# Altium footprint library Display.PcbLib: 7 footprints
Each footprint in its own frame and in the unit in brackets; x right, y up, seen from the top. Pads: shape width x height; smd on the part's side, far side on the other; paste and mask are expansions set on the pad; w line width, h text height; cw(c..) or ccw(c..) is an arc to the next point about the centre after c.
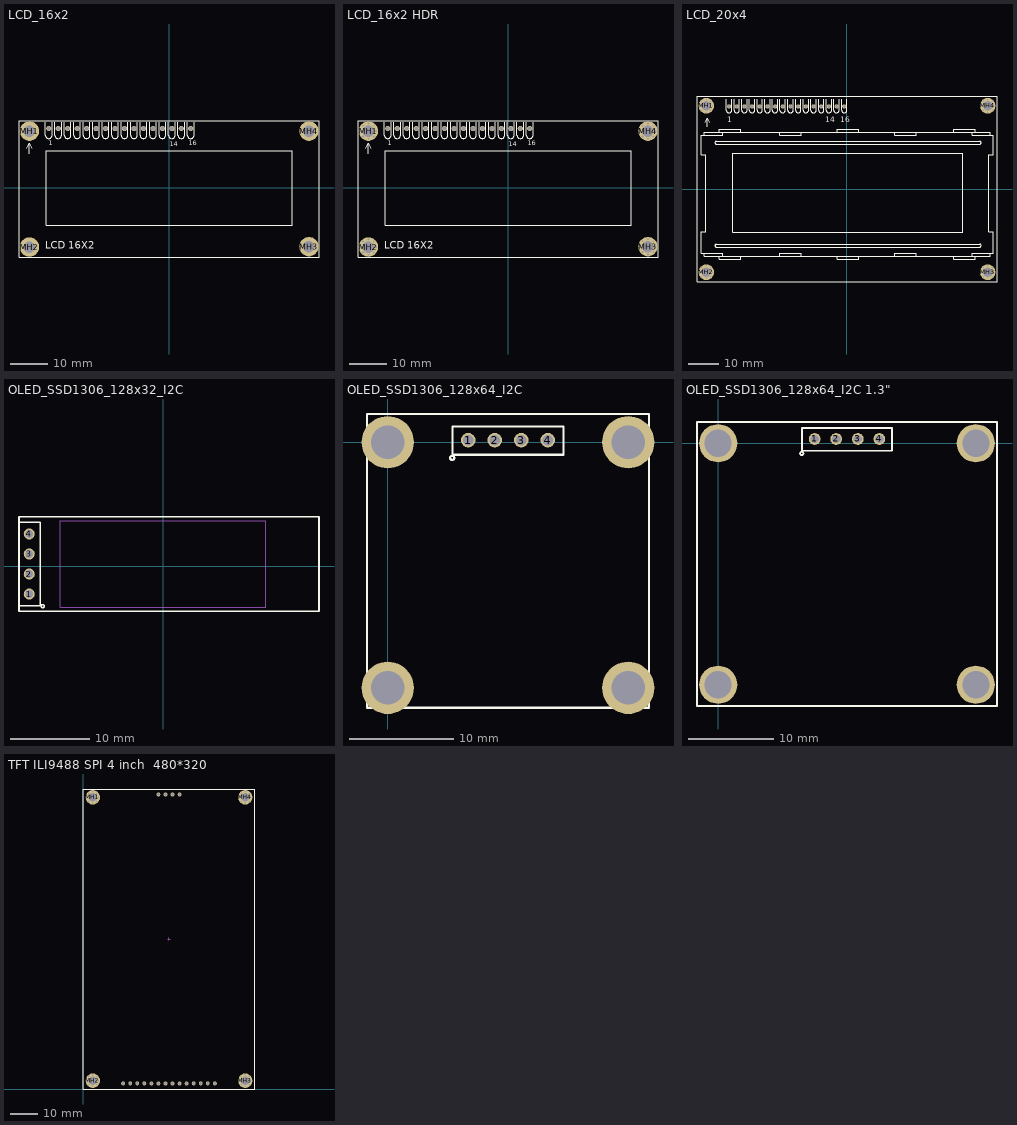
[diagram p0: the footprints below, top view; thin cyan lines are the x and y axes]

## LCD_16x2 [mm]
pads (20):
  round 1.4 / inner round 1.4 / far side oval 1.4x2.2 hole 1: 1(-32.3,15.9) 2(-29.76,15.9) 3(-27.22,15.9) 4(-24.68,15.9) 5(-22.14,15.9) 6(-19.6,15.9) 7(-17.06,15.9) 8(-14.52,15.9) 9(-11.98,15.9) 10(-9.44,15.9) 11(-6.9,15.9) 12(-4.36,15.9) 13(-1.82,15.9) 14(0.72,15.9) 15(3.26,15.9) 16(5.8,15.9)
  round 5.2 hole 3.1: MH1(-37.5,15.2) MH2(-37.5,-15.9) MH3(37.5,-15.8) MH4(37.5,15.2)
Top Overlay:
  lines w0.2: -38.154,10.666 -37.519,11.936 -36.884,10.666 ; -37.519,9.124 -37.519,11.809 ; -33.197,17.656 -33.197,14.1 ccw(c-32.308,14.1) -31.419,14.1 -31.419,17.656 ; -30.657,17.656 -30.657,14.1 ccw(c-29.768,14.1) -28.879,14.1 -28.879,17.656 ; -28.117,17.656 -28.117,14.1 ccw(c-27.228,14.1) -26.339,14.1 -26.339,17.656 ; -25.577,17.656 -25.577,14.1 ccw(c-24.688,14.1) -23.799,14.1 -23.799,17.656 ; -23.037,17.656 -23.037,14.1 ccw(c-22.148,14.1) -21.259,14.1 -21.259,17.656 ; -20.497,17.656 -20.497,14.1 ccw(c-19.608,14.1) -18.719,14.1 -18.719,17.656 ; -17.957,17.656 -17.957,14.1 ccw(c-17.068,14.1) -16.179,14.1 -16.179,17.656 ; -15.417,17.656 -15.417,14.1 ccw(c-14.528,14.1) -13.639,14.1 -13.639,17.656 ; -12.877,17.656 -12.877,14.1 ccw(c-11.988,14.1) -11.099,14.1 -11.099,17.656 ; -10.337,17.656 -10.337,14.1 ccw(c-9.448,14.1) -8.559,14.1 -8.559,17.656 ; -7.797,17.656 -7.797,14.1 ccw(c-6.908,14.1) -6.019,14.1 -6.019,17.656 ; -5.257,17.656 -5.257,14.1 ccw(c-4.368,14.1) -3.479,14.1 -3.479,17.656 ; -2.717,17.656 -2.717,14.1 ccw(c-1.828,14.1) -0.939,14.1 -0.939,17.656 ; -0.177,17.656 -0.177,14.1 ccw(c0.712,14.1) 1.601,14.1 1.601,17.656 ; 2.363,17.656 2.363,14.1 ccw(c3.252,14.1) 4.141,14.1 4.141,17.656 ; 4.903,17.656 4.903,14.1 ccw(c5.792,14.1) 6.681,14.1 6.681,17.656 ; -40.292,-18.568 40.208,-18.568 40.208,17.932 -40.292,17.932 -40.292,-18.568 ; -33,-10 33,-10 33,10 -33,10 -33,-10
  text "LCD 16X2" at -33.182,-16.296 h2
  text "16" at 5.284,11.433 h1.27
  text "1" at -32.308,11.433 h1.27
  text "14" at 0.204,11.179 h1.27
3D body "LCD 16x2 JHD162A.step": height 13.16, standoff 0.01, extent -39.997,-18.36 40.003,17.64
3D body "SCRW_CHSH_PHLIPS_M3X5.stp": height 6.43, standoff -0.9, extent 34.5,-18.8 40.5,-12.8
3D body "SCRW_CHSH_PHLIPS_M3X5.stp": height 6.43, standoff -0.9, extent -40.5,-18.9 -34.5,-12.9
3D body "SCRW_CHSH_PHLIPS_M3X5.stp": height 6.43, standoff -0.9, extent 34.5,12.2 40.5,18.2
3D body "SCRW_CHSH_PHLIPS_M3X5.stp": height 6.43, standoff -0.9, extent -40.5,12.2 -34.5,18.2
3D body "pin_header_aw140-eg-g02a.stp": height 8.72, standoff -3.68, extent 1.99,14.65 6.97,17.15
3D body "pin_header_aw140-eg-g02a.stp": height 8.72, standoff -3.68, extent -3.09,14.65 1.89,17.15
3D body "pin_header_aw140-eg-g02a.stp": height 8.72, standoff -3.68, extent -8.17,14.65 -3.19,17.15
3D body "pin_header_aw140-eg-g02a.stp": height 8.72, standoff -3.68, extent -13.25,14.65 -8.27,17.15
3D body "pin_header_aw140-eg-g02a.stp": height 8.72, standoff -3.68, extent -18.33,14.65 -13.35,17.15
3D body "pin_header_aw140-eg-g02a.stp": height 8.72, standoff -3.68, extent -23.41,14.65 -18.43,17.15
3D body "pin_header_aw140-eg-g02a.stp": height 8.72, standoff -3.68, extent -28.49,14.65 -23.51,17.15
3D body "pin_header_aw140-eg-g02a.stp": height 8.72, standoff -3.68, extent -33.57,14.65 -28.59,17.15

## LCD_16x2 HDR [mm]
pads (20):
  round 1.4 / inner round 1.4 / far side oval 1.4x2.2 hole 1: 1(-32.3,15.9) 2(-29.76,15.9) 3(-27.22,15.9) 4(-24.68,15.9) 5(-22.14,15.9) 6(-19.6,15.9) 7(-17.06,15.9) 8(-14.52,15.9) 9(-11.98,15.9) 10(-9.44,15.9) 11(-6.9,15.9) 12(-4.36,15.9) 13(-1.82,15.9) 14(0.72,15.9) 15(3.26,15.9) 16(5.8,15.9)
  round 5.2 hole 3.1: MH1(-37.5,15.2) MH2(-37.5,-15.9) MH3(37.5,-15.8) MH4(37.5,15.2)
via -35.45,15.2 diameter 1 hole 0.5
via -36.051,16.649 diameter 1 hole 0.5
via -37.5,17.25 diameter 1 hole 0.5
via -38.95,16.649 diameter 1 hole 0.5
via -39.55,15.2 diameter 1 hole 0.5
via -38.95,13.75 diameter 1 hole 0.5
via -37.5,13.15 diameter 1 hole 0.5
via -36.051,13.75 diameter 1 hole 0.5
via -35.45,-15.9 diameter 1 hole 0.5
via -36.051,-14.451 diameter 1 hole 0.5
via -37.5,-13.85 diameter 1 hole 0.5
via -38.95,-14.451 diameter 1 hole 0.5
via -39.55,-15.9 diameter 1 hole 0.5
via -38.95,-17.35 diameter 1 hole 0.5
via -37.5,-17.95 diameter 1 hole 0.5
via -36.051,-17.35 diameter 1 hole 0.5
via 39.55,-15.8 diameter 1 hole 0.5
via 38.949,-14.351 diameter 1 hole 0.5
via 37.5,-13.75 diameter 1 hole 0.5
via 36.05,-14.351 diameter 1 hole 0.5
via 35.45,-15.8 diameter 1 hole 0.5
via 36.05,-17.25 diameter 1 hole 0.5
via 37.5,-17.85 diameter 1 hole 0.5
via 38.949,-17.25 diameter 1 hole 0.5
via 39.55,15.2 diameter 1 hole 0.5
via 38.949,16.649 diameter 1 hole 0.5
via 37.5,17.25 diameter 1 hole 0.5
via 36.05,16.649 diameter 1 hole 0.5
via 35.45,15.2 diameter 1 hole 0.5
via 36.05,13.75 diameter 1 hole 0.5
via 37.5,13.15 diameter 1 hole 0.5
via 38.949,13.75 diameter 1 hole 0.5
Top Overlay:
  lines w0.2: -38.154,10.666 -37.519,11.936 -36.884,10.666 ; -37.519,9.124 -37.519,11.809 ; -33.197,17.656 -33.197,14.1 ccw(c-32.308,14.1) -31.419,14.1 -31.419,17.656 ; -30.657,17.656 -30.657,14.1 ccw(c-29.768,14.1) -28.879,14.1 -28.879,17.656 ; -28.117,17.656 -28.117,14.1 ccw(c-27.228,14.1) -26.339,14.1 -26.339,17.656 ; -25.577,17.656 -25.577,14.1 ccw(c-24.688,14.1) -23.799,14.1 -23.799,17.656 ; -23.037,17.656 -23.037,14.1 ccw(c-22.148,14.1) -21.259,14.1 -21.259,17.656 ; -20.497,17.656 -20.497,14.1 ccw(c-19.608,14.1) -18.719,14.1 -18.719,17.656 ; -17.957,17.656 -17.957,14.1 ccw(c-17.068,14.1) -16.179,14.1 -16.179,17.656 ; -15.417,17.656 -15.417,14.1 ccw(c-14.528,14.1) -13.639,14.1 -13.639,17.656 ; -12.877,17.656 -12.877,14.1 ccw(c-11.988,14.1) -11.099,14.1 -11.099,17.656 ; -10.337,17.656 -10.337,14.1 ccw(c-9.448,14.1) -8.559,14.1 -8.559,17.656 ; -7.797,17.656 -7.797,14.1 ccw(c-6.908,14.1) -6.019,14.1 -6.019,17.656 ; -5.257,17.656 -5.257,14.1 ccw(c-4.368,14.1) -3.479,14.1 -3.479,17.656 ; -2.717,17.656 -2.717,14.1 ccw(c-1.828,14.1) -0.939,14.1 -0.939,17.656 ; -0.177,17.656 -0.177,14.1 ccw(c0.712,14.1) 1.601,14.1 1.601,17.656 ; 2.363,17.656 2.363,14.1 ccw(c3.252,14.1) 4.141,14.1 4.141,17.656 ; 4.903,17.656 4.903,14.1 ccw(c5.792,14.1) 6.681,14.1 6.681,17.656 ; -40.292,-18.568 40.208,-18.568 40.208,17.932 -40.292,17.932 -40.292,-18.568 ; -33,-10 33,-10 33,10 -33,10 -33,-10
  text "LCD 16X2" at -33.182,-16.296 h2
  text "16" at 5.284,11.433 h1.27
  text "1" at -32.308,11.433 h1.27
  text "14" at 0.204,11.179 h1.27
3D body "LCD 16x2 JHD162A.step": height 25.6, standoff 12.45, extent -39.997,-18.36 40.003,17.64
3D body "14801-15 H.STEP": height 18.71, standoff -3.71, extent -39.8,12.9 -35.2,17.5
3D body "14801-15 H.STEP": height 18.71, standoff -3.71, extent -39.8,-18.2 -35.2,-13.6
3D body "14801-15 H.STEP": height 18.71, standoff -3.71, extent 35.2,-18.1 39.8,-13.5
3D body "14801-15 H.STEP": height 18.71, standoff -3.71, extent 35.2,12.9 39.8,17.5
3D body "PBD-2.stp": height 8.5, standoff -3.15, extent 1.99,14.63 7.07,17.17
3D body "PBD-2.stp": height 8.5, standoff -3.15, extent -3.09,14.63 1.99,17.17
3D body "PBD-2.stp": height 8.5, standoff -3.15, extent -8.17,14.63 -3.09,17.17
3D body "PBD-2.stp": height 8.5, standoff -3.15, extent -13.25,14.63 -8.17,17.17
3D body "PBD-2.stp": height 8.5, standoff -3.15, extent -18.33,14.63 -13.25,17.17
3D body "PBD-2.stp": height 8.5, standoff -3.15, extent -23.41,14.63 -18.33,17.17
3D body "PBD-2.stp": height 8.5, standoff -3.15, extent -28.49,14.63 -23.41,17.17
3D body "PBD-2.stp": height 8.5, standoff -3.15, extent -33.57,14.63 -28.49,17.17

## LCD_20x4 [mm] "93*55mm"
pads (20):
  round 1.4 / inner round 1.4 / far side oval 1.4x2.2 hole 1: 1(-39,27.3) 2(-36.46,27.3) 3(-33.92,27.3) 4(-31.38,27.3) 5(-28.84,27.3) 6(-26.3,27.3) 7(-23.76,27.3) 8(-21.22,27.3) 9(-18.68,27.3) 10(-16.14,27.3) 11(-13.6,27.3) 12(-11.06,27.3) 13(-8.52,27.3) 14(-5.98,27.3) 15(-3.44,27.3) 16(-0.9,27.3)
  round 5.2 hole 3.1: MH1(-46.5,27.5) MH2(-46.5,-27.5) MH3(46.5,-27.5) MH4(46.5,27.5)
via -44.45,27.5 diameter 1 hole 0.5
via -45.051,28.949 diameter 1 hole 0.5
via -46.5,29.55 diameter 1 hole 0.5
via -47.95,28.949 diameter 1 hole 0.5
via -48.55,27.5 diameter 1 hole 0.5
via -47.95,26.05 diameter 1 hole 0.5
via -46.5,25.45 diameter 1 hole 0.5
via -45.051,26.05 diameter 1 hole 0.5
via 48.55,27.5 diameter 1 hole 0.5
via 47.949,28.949 diameter 1 hole 0.5
via 46.5,29.55 diameter 1 hole 0.5
via 45.05,28.949 diameter 1 hole 0.5
via 44.45,27.5 diameter 1 hole 0.5
via 45.05,26.05 diameter 1 hole 0.5
via 46.5,25.45 diameter 1 hole 0.5
via 47.949,26.05 diameter 1 hole 0.5
via 48.55,-27.5 diameter 1 hole 0.5
via 47.949,-26.051 diameter 1 hole 0.5
via 46.5,-25.45 diameter 1 hole 0.5
via 45.05,-26.051 diameter 1 hole 0.5
via 44.45,-27.5 diameter 1 hole 0.5
via 45.05,-28.95 diameter 1 hole 0.5
via 46.5,-29.55 diameter 1 hole 0.5
via 47.949,-28.95 diameter 1 hole 0.5
via -44.45,-27.5 diameter 1 hole 0.5
via -45.051,-26.051 diameter 1 hole 0.5
via -46.5,-25.45 diameter 1 hole 0.5
via -47.95,-26.051 diameter 1 hole 0.5
via -48.55,-27.5 diameter 1 hole 0.5
via -47.95,-28.95 diameter 1 hole 0.5
via -46.5,-29.55 diameter 1 hole 0.5
via -45.051,-28.95 diameter 1 hole 0.5
Top Overlay:
  lines w0.2: -46.874,22.13 -46.239,23.4 -45.604,22.13 ; -46.239,20.588 -46.239,23.273 ; -39.889,29.623 -39.889,26.067 ccw(c-39,26.067) -38.111,26.067 -38.111,29.623 ; -37.349,29.623 -37.349,26.067 ccw(c-36.46,26.067) -35.571,26.067 -35.571,29.623 ; -34.809,29.623 -34.809,26.067 ccw(c-33.92,26.067) -33.031,26.067 -33.031,29.623 ; -32.269,29.623 -32.269,26.067 ccw(c-31.38,26.067) -30.491,26.067 -30.491,29.623 ; -29.729,29.623 -29.729,26.067 ccw(c-28.84,26.067) -27.951,26.067 -27.951,29.623 ; -27.189,29.623 -27.189,26.067 ccw(c-26.3,26.067) -25.411,26.067 -25.411,29.623 ; -24.713,29.623 -24.713,26.067 ccw(c-23.824,26.067) -22.935,26.067 -22.935,29.623 ; -22.173,29.623 -22.173,26.067 ccw(c-21.284,26.067) -20.395,26.067 -20.395,29.623 ; -19.569,29.623 -19.569,26.067 ccw(c-18.68,26.067) -17.791,26.067 -17.791,29.623 ; -17.029,29.623 -17.029,26.067 ccw(c-16.14,26.067) -15.251,26.067 -15.251,29.623 ; -14.489,29.623 -14.489,26.067 ccw(c-13.6,26.067) -12.711,26.067 -12.711,29.623 ; -11.949,29.623 -11.949,26.067 ccw(c-11.06,26.067) -10.171,26.067 -10.171,29.623 ; -9.409,29.623 -9.409,26.067 ccw(c-8.52,26.067) -7.631,26.067 -7.631,29.623 ; -6.869,29.623 -6.869,26.067 ccw(c-5.98,26.067) -5.091,26.067 -5.091,29.623 ; -4.393,29.623 -4.393,26.067 ccw(c-3.504,26.067) -2.615,26.067 -2.615,29.623 ; -1.789,29.623 -1.789,26.067 ccw(c-0.9,26.067) -0.011,26.067 -0.011,29.623 ; -47.16,-21.21 -48.16,-21.21 -48.16,-14.21 -46.66,-14.21 -46.66,11.289 -48.16,11.289 -48.16,17.789 -47.16,17.789 ; -47.16,-21.21 -41.16,-21.21 -41.16,-22.211 ; -47.16,-21.21 -47.16,-22.211 -42.16,-22.211 ; -47.16,17.789 -41.16,17.789 -41.16,18.79 ; -47.16,17.789 -47.16,18.79 -42.16,18.79 ; -42.16,-22.211 -41.16,-22.211 ; -42.16,-22.211 -42.16,-23.212 -35.16,-23.212 -35.16,-22.211 ; -42.16,18.79 -41.16,18.79 ; -42.16,18.79 -42.16,19.788 -35.16,19.788 -35.16,18.79 ; -41.16,-22.211 -35.16,-22.211 ; -41.16,18.79 -35.16,18.79 ; -35.16,-22.211 -22.16,-22.211 ; -35.16,18.79 -22.16,18.79 ; -22.16,-22.211 -15.16,-22.211 ; -22.16,-22.211 -22.16,-21.21 -15.16,-21.21 -15.16,-22.211 ; -22.16,18.79 -15.16,18.79 ; -22.16,18.79 -22.16,17.789 -15.16,17.789 -15.16,18.79 ; -15.16,-22.211 -3.16,-22.211 ; -15.16,18.79 -3.16,18.79 ; -3.16,-22.211 3.84,-22.211 ; -3.16,-22.211 -3.16,-23.212 3.84,-23.212 3.84,-22.211 ; -3.16,18.79 3.84,18.79 ; -3.16,18.79 -3.16,19.788 3.84,19.788 3.84,18.79 ; 3.84,-22.211 15.84,-22.211 ; 3.84,18.79 15.84,18.79 ; 15.84,-22.211 22.84,-22.211 ; 15.84,-22.211 15.84,-21.21 22.84,-21.21 22.84,-22.211 ; 15.84,18.79 22.84,18.79 ; 15.84,18.79 15.84,17.789 22.84,17.789 22.84,18.79 ; 22.84,-22.211 35.34,-22.211 ; 22.84,18.79 35.34,18.79 ; 35.34,-22.211 41.34,-22.211 ; 35.34,-22.211 35.34,-23.212 42.34,-23.212 42.34,-22.211 ; 35.34,18.79 41.34,18.79 ; 35.34,18.79 35.34,19.788 42.34,19.788 42.34,18.79 ; 41.34,-22.211 42.34,-22.211 ; 41.34,-22.211 41.34,-21.21 47.34,-21.21 ; 41.34,18.79 42.34,18.79 ; 41.34,18.79 41.34,17.789 47.34,17.789 ; 42.34,-22.211 47.34,-22.211 47.34,-21.21 ; 42.34,18.79 47.34,18.79 47.34,17.789 ; 47.34,-21.21 48.34,-21.21 48.34,-14.21 46.84,-14.21 46.84,11.289 48.34,11.289 48.34,17.789 47.34,17.789 ; -43.16,-19.211 cw(c-43.16,-18.711) -43.16,-18.211 43.84,-18.21 cw(c43.84,-18.711) 43.84,-19.211 -43.16,-19.211 ; -43.16,14.79 cw(c-43.16,15.29) -43.16,15.79 43.84,15.79 cw(c43.84,15.29) 43.84,14.79 -43.16,14.789 ; -37.71,-14.301 38.3,-14.301 38.3,11.759 -37.71,11.759 -37.71,-14.301
  lines w0.254: -49.6,-30.6 49.6,-30.6 49.6,30.6 -49.6,30.6 -49.6,-30.6
  text "1" at -39.635,22.13 h1.78
  text "16" at -2.17,22.13 h1.78
  text "14" at -7.25,22.13 h1.78
3D body "SCRW_CHSH_PHLIPS_M3X5.stp": height 6.43, standoff -0.9, extent -49.5,-30.5 -43.5,-24.5
3D body "SCRW_CHSH_PHLIPS_M3X5.stp": height 6.43, standoff -0.9, extent 43.5,-30.5 49.5,-24.5
3D body "SCRW_CHSH_PHLIPS_M3X5.stp": height 6.43, standoff -0.9, extent 43.5,24.5 49.5,30.5
3D body "SCRW_CHSH_PHLIPS_M3X5.stp": height 6.43, standoff -0.9, extent -49.5,24.5 -43.5,30.5
3D body "pin_header_aw140-eg-g02a.stp": height 8.72, standoff -3.68, extent -40.27,26.05 -35.29,28.55
3D body "pin_header_aw140-eg-g02a.stp": height 8.72, standoff -3.68, extent -35.19,26.05 -30.21,28.55
3D body "pin_header_aw140-eg-g02a.stp": height 8.72, standoff -3.68, extent -30.11,26.05 -25.13,28.55
3D body "pin_header_aw140-eg-g02a.stp": height 8.72, standoff -3.68, extent -25.03,26.05 -20.05,28.55
3D body "pin_header_aw140-eg-g02a.stp": height 8.72, standoff -3.68, extent -19.95,26.05 -14.97,28.55
3D body "pin_header_aw140-eg-g02a.stp": height 8.72, standoff -3.68, extent -14.87,26.05 -9.89,28.55
3D body "pin_header_aw140-eg-g02a.stp": height 8.72, standoff -3.68, extent -9.79,26.05 -4.81,28.55
3D body "pin_header_aw140-eg-g02a.stp": height 8.72, standoff -3.68, extent -4.71,26.05 0.27,28.55
3D body "ERM2004-2_3D.stp": height 14.01, standoff 0.01, extent -49,-30 49,30

## OLED_SSD1306_128x32_I2C [mm] "OLED SS1306 Breakout, 128X64, I2C"
height 10
pads (4):
  round 1.4 / inner round 1.4 / far side oval 2.2x1.4 hole 1: 1(-17,-3.54)
  round 1.4 / inner round 1.4 / far side oval 2.2x1.4 hole 1 mask+0.1: 2(-17,-1) 3(-17,1.54) 4(-17,4.08)
Top Overlay:
  circle w0.2: c-15.3,-5.07 r0.2
  lines w0.2: -18.3,-5.73 19.7,-5.73 19.7,6.27 -18.3,6.27 -18.3,-5.73 ; -18.3,-5.03 -15.6,-5.03 -15.6,5.57 -18.3,5.57 -18.3,-5.03
Mechanical 15:
  lines w0.1: -13.05,-5.23 12.95,-5.23 12.95,5.77 -13.05,5.77 -13.05,-5.23
3D body "128x32-OLED_14.STEP": height 5.6, standoff -6.34, extent -18.3,-5.73 19.7,6.27

## OLED_SSD1306_128x64_I2C [mm] "OLED SS1306 Breakout, 128X64, I2C"
height 10
pads (8):
  round 1.4 / inner round 1.4 / far side oval 1.4x2.2 hole 1: 1(7.69,0.2)
  round 1.4 / inner round 1.4 / far side oval 1.4x2.2 hole 1 mask+0.1: 2(10.23,0.2) 3(12.77,0.2) 4(15.31,0.2)
  round 5 hole 3.2: ""(0,-23.5) ""(0,0) ""(23,-23.5) ""(23,0)
Top Overlay:
  circle w0.2: c6.16,-1.5 r0.2
  lines w0.2: -2,-25.4 25,-25.4 25,2.7 -2,2.7 -2,-25.4 ; 6.2,-1.2 6.2,1.5 16.8,1.5 16.8,-1.2 6.2,-1.2
3D body "Screw-3mmX10mm.step": height 12.73, standoff 1, extent 20.5,-26 25.5,-21
3D body "Screw-3mmX10mm.step": height 12.73, standoff 1, extent 20.5,-2.5 25.5,2.5
3D body "Screw-3mmX10mm.step": height 12.73, standoff 1, extent -2.5,-2.5 2.5,2.5
3D body "Screw-3mmX10mm.step": height 12.73, standoff 1, extent -2.5,-26 2.5,-21
3D body "female_header_a-bl254-eg-g02d.stp": height 8.5, standoff -3.2, extent 6.295,-1.1 11.625,1.4
3D body "female_header_a-bl254-eg-g02d.stp": height 8.5, standoff -3.2, extent 11.375,-1.1 16.705,1.4
3D body "User Library-128x64I2COLEDDisplayAdafruit_SSD1306.step": height 12.97, standoff 2.13, extent -1.85,-25.3 24.85,2.56

## OLED_SSD1306_128x64_I2C 1.3" [mm] "OLED SS1306 Breakout, 128X64, I2C"
height 10
pads (8):
  round 1.4 / inner round 1.4 / far side oval 1.4x2.2 hole 1: 1(11.39,0.5) 2(13.93,0.5) 3(16.47,0.5) 4(19.01,0.5)
  round 4.5 hole 3.2: ""(0,-28.5) ""(0,0) ""(30.4,-28.5) ""(30.4,0)
Top Overlay:
  circle w0.2: c9.86,-1.2 r0.2
  lines w0.2: -2.5,-31 32.9,-31 32.9,2.5 -2.5,2.5 -2.5,-31 ; 9.9,-0.9 9.9,1.8 20.5,1.8 20.5,-0.9 9.9,-0.9
3D body "Screw-3mmX10mm.step": height 12.73, standoff 1, extent -2.5,-31 2.5,-26
3D body "Screw-3mmX10mm.step": height 12.73, standoff 1, extent -2.5,-2.5 2.5,2.5
3D body "Screw-3mmX10mm.step": height 12.73, standoff 1, extent 27.9,-2.5 32.9,2.5
3D body "Screw-3mmX10mm.step": height 12.73, standoff 1, extent 27.9,-31 32.9,-26
3D body "female_header_a-bl254-eg-g02d.stp": height 8.5, standoff -3.2, extent 9.995,-0.8 15.325,1.7
3D body "female_header_a-bl254-eg-g02d.stp": height 8.5, standoff -3.2, extent 15.075,-0.8 20.405,1.7
3D body "PCB v8.step": height 13, standoff -4.14, extent -2.5,-31.762 32.9,1.738

## TFT ILI9488 SPI 4 inch  480*320 [mm] "TFT 4/3.95 inch"
pads (22):
  round 1.4 / inner round 1.4 / far side oval 1.4x2.2 hole 1 mask+0.1: 1(14.36,2) 2(16.9,2) 3(19.44,2) 4(21.98,2) 5(24.52,2) 6(27.06,2) 7(29.6,2) 8(32.14,2) 9(34.68,2) 10(37.22,2) 11(39.76,2) 12(42.3,2) 13(44.84,2) 14(47.38,2) 15(34.68,106.04) 16(32.14,106.04) 17(29.6,106.04) 18(27.06,106.04)
  round 5.2 hole 3.1: MH1(3.42,105.04) MH2(3.42,3) MH3(58.32,3) MH4(58.32,105.04)
via 60.37,3 diameter 1 hole 0.5
via 59.769,4.449 diameter 1 hole 0.5
via 58.32,5.05 diameter 1 hole 0.5
via 56.87,4.449 diameter 1 hole 0.5
via 56.27,3 diameter 1 hole 0.5
via 56.87,1.55 diameter 1 hole 0.5
via 58.32,0.95 diameter 1 hole 0.5
via 59.769,1.55 diameter 1 hole 0.5
via 5.47,3 diameter 1 hole 0.5
via 4.869,4.449 diameter 1 hole 0.5
via 3.42,5.05 diameter 1 hole 0.5
via 1.97,4.449 diameter 1 hole 0.5
via 1.37,3 diameter 1 hole 0.5
via 1.97,1.55 diameter 1 hole 0.5
via 3.42,0.95 diameter 1 hole 0.5
via 4.869,1.55 diameter 1 hole 0.5
via 60.37,105.04 diameter 1 hole 0.5
via 59.769,106.489 diameter 1 hole 0.5
via 58.32,107.09 diameter 1 hole 0.5
via 56.87,106.489 diameter 1 hole 0.5
via 56.27,105.04 diameter 1 hole 0.5
via 56.87,103.59 diameter 1 hole 0.5
via 58.32,102.99 diameter 1 hole 0.5
via 59.769,103.59 diameter 1 hole 0.5
via 5.47,105.04 diameter 1 hole 0.5
via 4.869,106.489 diameter 1 hole 0.5
via 3.42,107.09 diameter 1 hole 0.5
via 1.97,106.489 diameter 1 hole 0.5
via 1.37,105.04 diameter 1 hole 0.5
via 1.97,103.59 diameter 1 hole 0.5
via 3.42,102.99 diameter 1 hole 0.5
via 4.869,103.59 diameter 1 hole 0.5
Top Overlay:
  lines w0.2: 0,0 0,108.04 61.74,108.04 61.74,0 0,0
Mechanical 1:
  lines w0.2: 30.37,54.02 31.37,54.02 ; 30.87,53.52 30.87,54.52
3D body "female_header_a-bl254-eg-g04d.stp": height 8.5, standoff -3.2, extent 25.665,104.79 36.075,107.29
3D body "female_header_a-bl254-eg-g07d.stp": height 8.5, standoff -3.2, extent 30.745,0.75 48.775,3.25
3D body "female_header_a-bl254-eg-g07d.stp": height 8.5, standoff -3.2, extent 12.965,0.75 30.995,3.25
3D body "pin_header_aw140-eg-g07d.stp": height 14, standoff 2.8, extent 30.87,0.758 48.65,3.256
3D body "pin_header_aw140-eg-g07d.stp": height 14, standoff 2.8, extent 13.09,0.758 30.87,3.256
3D body "pin_header_aw140-eg-g02a.stp": height 14.88, standoff 2.48, extent 30.97,104.79 35.95,107.29
3D body "pin_header_aw140-eg-g02a.stp": height 14.88, standoff 2.48, extent 25.89,104.79 30.87,107.29
3D body "Hex Spacer MF M3 L11mm.stp": height 11, standoff -6, extent 0.92,102.153 5.92,107.927
3D body "SCRW_CHSH_PHLIPS_M3X5.stp": height 14.53, standoff 7.2, extent 0.42,102.04 6.42,108.04
3D body "Hex Spacer MF M3 L11mm.stp": height 11, standoff -6, extent 55.82,102.153 60.82,107.927
3D body "SCRW_CHSH_PHLIPS_M3X5.stp": height 14.53, standoff 7.2, extent 55.32,102.04 61.32,108.04
3D body "Hex Spacer MF M3 L11mm.stp": height 11, standoff -6, extent 55.82,0.113 60.82,5.887
3D body "SCRW_CHSH_PHLIPS_M3X5.stp": height 14.53, standoff 7.2, extent 55.32,0 61.32,6
3D body "Hex Spacer MF M3 L11mm.stp": height 11, standoff -6, extent 0.92,0.113 5.92,5.887
3D body "SCRW_CHSH_PHLIPS_M3X5.stp": height 14.53, standoff 7.2, extent 0.42,0 6.42,6
3D body "4.0 inch TFT.SLDPRT": height 15.11, standoff 11.01, extent 0.13,-0.04 61.87,108